# Altium schematic symbol library FPGAENTRY.SchLib: 48 symbols
Pins are listed as number, name and electrical type; pins without a type are passive.

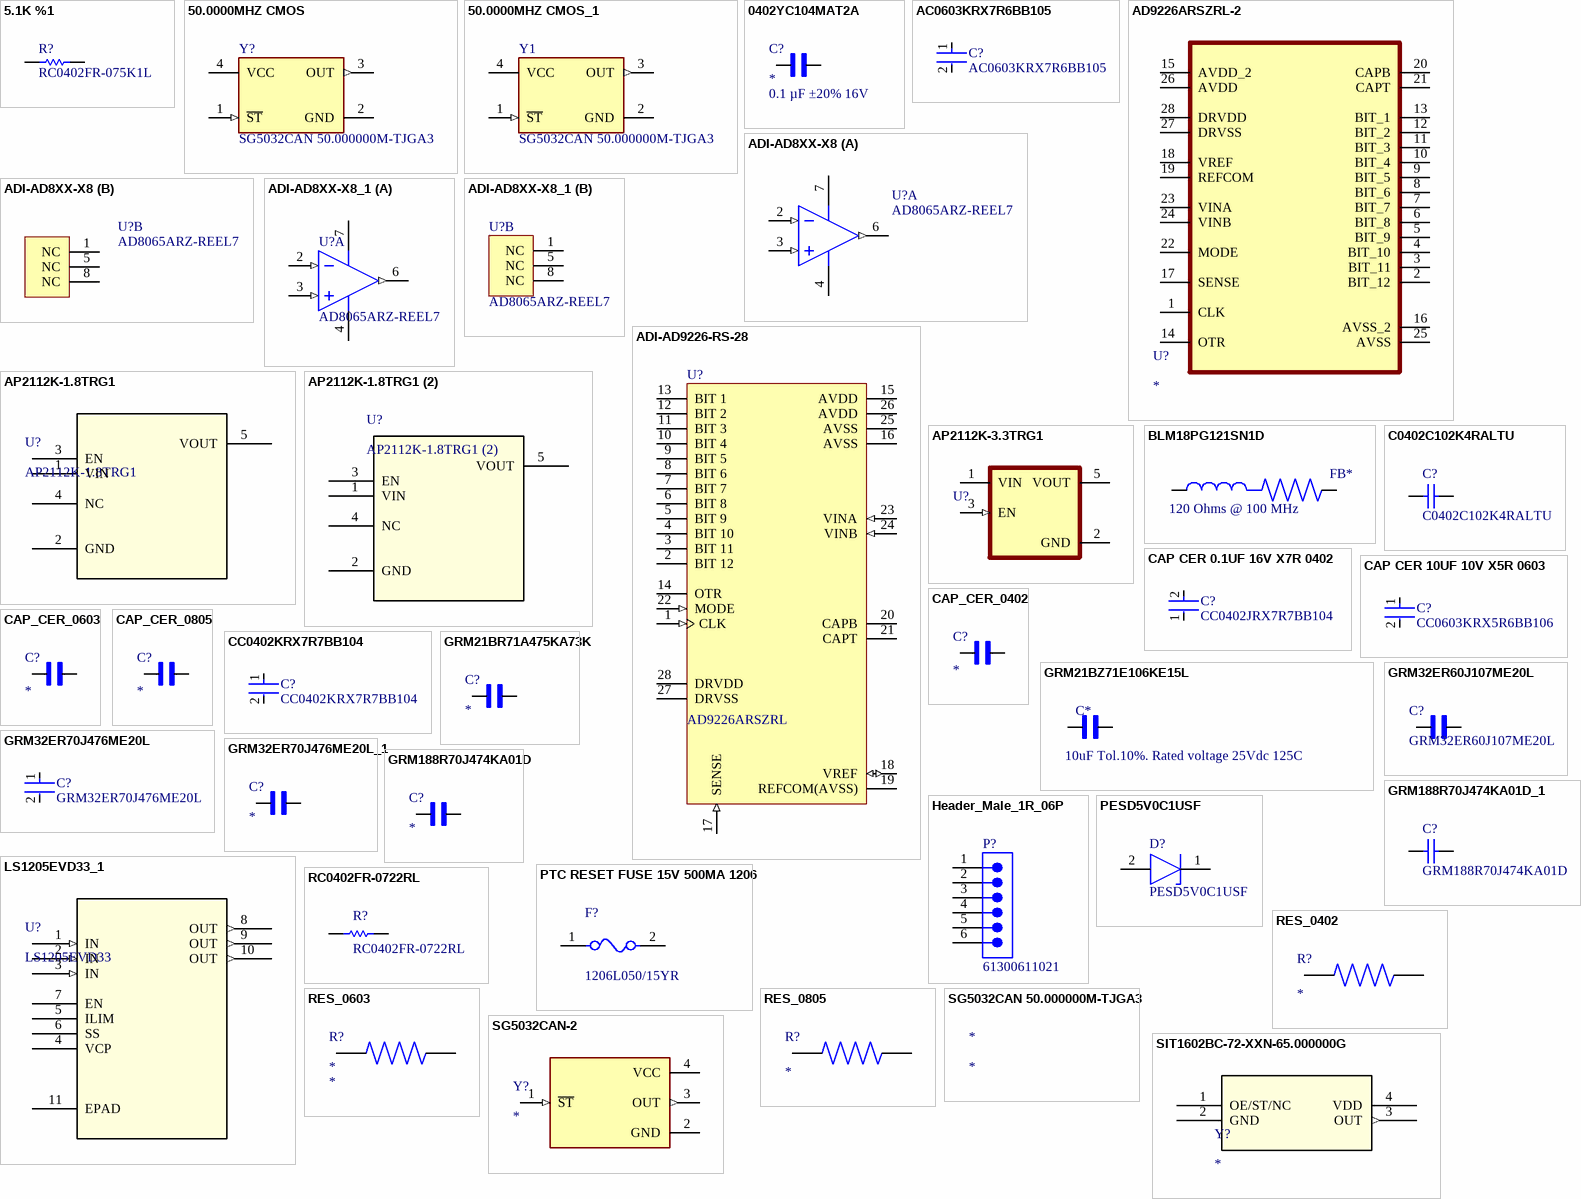
[diagram p0: symbols 5.1K %1 to SIT1602BC-72-XXN-65.000000G]

## 5.1K %1
designator R?, comment RC0402FR-075K1L
Manufacturer: Yageo / Phycomp; Part Number: RC0402FR-075K1L
footprint RESC1005X40X25NL05T10 (Chip Resistor, 2-Leads, Body 1.00x0.50mm, IPC Medium Density)
footprint RESC1005X40X25ML05T10 (Chip Resistor, 2-Leads, Body 1.00x0.50mm, IPC Low Density)
footprint RESC1005X40X25LL05T10 (Chip Resistor, 2-Leads, Body 1.00x0.50mm, IPC High Density)
pins: 1, 2
1 alternate drawing of the same symbol

## 50.0000MHZ CMOS
designator Y?, comment SG5032CAN 50.000000M-TJGA3
XTAL OSC XO 50.0000MHZ CMOS SMD; Manufacturer Part Number: SG5032CAN 40.000000M-TJGA3; Manufacturer: EPSON; Max Supply Current: 2.2mA; Frequency: 50MHz; Min Supply Voltage: 1.6V; Load Capacitance: 15pF; Max Supply Voltage: 3.63V; Fall Time: 4ns; Frequency Stability: 50ppm; Temperature: -40°C to +85°C; Category: Crys; Device Class L3: Oscillators; Package: 0; Automotive: No; Digikey Description: XTAL OSC XO 40.0000MHZ CMOS SMD; ComponentLink2URL: https://support.epson.biz/td/api/doc_check.php?dl=brief_SG7050CAN&lang=en; ComponentLink2Description: Datasheet; Lead Free: Yes; Octopart: https://octopart.com/sg5032can+40.000000m-tjga3-epson-58756424; Series: SG5032CAN; Device Class L1: Passive Components; Height: 1.3mm; RoHS: TRUE; Temperature Range High: +85°C; Device Class L2: Crystals / Oscillators; Temperature Range Low: -40°C; Supplier: Future Electronics; Supplier Part Number: SG5032CAN 50.000000M-TJGA3; Pricing: 250=1,38, 500=1,36 (USD); Case/Package: SMD/SMT; China RoHS: Compliant; Country of Origin: Japan, Mainland China, Malaysia, Thailand; Introduction Date: 2015-02-06; Length: 5.0038mm; Max Operating Temperature: 85°C; Min Operating Temperature: -40°C; Mounting Technology: Surface Mount; Number of Terminals: 4; Output Type: CMOS; REACH SVHC: Yes; Rise Time: 4ns; Schedule B: 8542390000; Width: 3.2004mm; ComponentLink1URL: https://datasheet.octopart.com:443/SG5032CAN50.000000M-TJGA3-Epson-datasheet-180664827.pdf?src-supplier=IHS; ComponentLink1Description: https://datasheet.octopart.com:443/SG5032CAN50.000000M-TJGA3-Epson-datasheet-180664827.pdf?src-supplier=IHS; ComponentLink3URL: https://datasheet.octopart.com:443/SG5032CAN-50.000000M-TJGA3-Epson-datasheet-149135270.pdf?src-supplier=Electro+Sonic; ComponentLink3Description: https://datasheet.octopart.com:443/SG5032CAN-50.000000M-TJGA3-Epson-datasheet-149135270.pdf?src-supplier=Electro+Sonic; ComponentLink4URL: https://datasheet.octopart.com:443/SG5032CAN50.000000M-TJGA3-Epson-datasheet-189100305.pdf?src-supplier=Electro+Sonic; ComponentLink4Description: https://datasheet.octopart.com:443/SG5032CAN50.000000M-TJGA3-Epson-datasheet-189100305.pdf?src-supplier=Electro+Sonic; ComponentLink5URL: https://datasheet.octopart.com:443/SG5032CAN-50.000000M-TJGA3-Epson-datasheet-64290201.pdf?src-supplier=ODG+(Origin+Data+Global); ComponentLink5Description: https://datasheet.octopart.com:443/SG5032CAN-50.000000M-TJGA3-Epson-datasheet-64290201.pdf?src-supplier=ODG+(Origin+Data+Global); ComponentLink6URL: https://datasheet.octopart.com:443/SG5032CAN-50.000000M-TJGA3-Epson-datasheet-164319076.pdf?src-supplier=Arrow.cn; ComponentLink6Description: https://datasheet.octopart.com:443/SG5032CAN-50.000000M-TJGA3-Epson-datasheet-164319076.pdf?src-supplier=Arrow.cn; ComponentLink7URL: https://datasheet.octopart.com:443/SG5032CAN-50.000000M-TJGA3-Epson-datasheet-140567393.pdf?src-supplier=Arrow.cn; ComponentLink7Description: https://datasheet.octopart.com:443/SG5032CAN-50.000000M-TJGA3-Epson-datasheet-140567393.pdf?src-supplier=Arrow.cn; ComponentLink8URL: http://sigma.octopart.com:80/149135295/rohs_statement/Epson-SG5032CAN-50.000000M-TJGA3.pdf?src-supplier=Compliance+Statements; ComponentLink8Description: http://sigma.octopart.com:80/149135295/rohs_statement/Epson-SG5032CAN-50.000000M-TJGA3.pdf?src-supplier=Compliance+Statements; ComponentLink9URL: http://sigma.octopart.com:80/149135294/reach_statement/Epson-SG5032CAN-50.000000M-TJGA3.pdf?src-supplier=Compliance+Statements; ComponentLink9Description: http://sigma.octopart.com:80/149135294/reach_statement/Epson-SG5032CAN-50.000000M-TJGA3.pdf?src-supplier=Compliance+Statements; Lifecycle Status: Production; ComponentLink10URL: https://datasheet.octopart.com:443/SIT1602BC-72-XXN-65.000000G-SiTime-datasheet-168041894.pdf?src-supplier=IHS; ComponentLink10Description: https://datasheet.octopart.com:443/SIT1602BC-72-XXN-65.000000G-SiTime-datasheet-168041894.pdf?src-supplier=IHS; ComponentLink11URL: https://datasheet.octopart.com:443/SIT1602BC-72-XXN-65.000000G-SiTime-datasheet-180805158.pdf?src-supplier=IHS; ComponentLink11Description: https://datasheet.octopart.com:443/SIT1602BC-72-XXN-65.000000G-SiTime-datasheet-180805158.pdf?src-supplier=IHS
footprint FP-SG5032CAN_40_000000M-T-MFG
pins: 1 ~{ST} (in), 2 GND (power), 3 OUT (out), 4 VCC (power)

## 50.0000MHZ CMOS_1
designator Y1, comment SG5032CAN 50.000000M-TJGA3
XTAL OSC XO 50.0000MHZ CMOS SMD; Manufacturer Part Number: SG5032CAN 40.000000M-TJGA3; Manufacturer: EPSON; Max Supply Current: 2.2mA; Frequency: 50MHz; Min Supply Voltage: 1.6V; Load Capacitance: 15pF; Max Supply Voltage: 3.63V; Fall Time: 4ns; Frequency Stability: 50ppm; Temperature: -40°C to +85°C; Category: Crys; Device Class L3: Oscillators; Package: 0; Automotive: No; Digikey Description: XTAL OSC XO 40.0000MHZ CMOS SMD; ComponentLink2URL: https://support.epson.biz/td/api/doc_check.php?dl=brief_SG7050CAN&lang=en; ComponentLink2Description: Datasheet; Lead Free: Yes; Octopart: https://octopart.com/sg5032can+40.000000m-tjga3-epson-58756424; Series: SG5032CAN; Device Class L1: Passive Components; Height: 1.3mm; RoHS: TRUE; Temperature Range High: +85°C; Device Class L2: Crystals / Oscillators; Temperature Range Low: -40°C; Supplier: Future Electronics; Supplier Part Number: SG5032CAN 50.000000M-TJGA3; Pricing: 250=1,38, 500=1,36 (USD); Case/Package: SMD/SMT; China RoHS: Compliant; Country of Origin: Japan, Mainland China, Malaysia, Thailand; Introduction Date: 2015-02-06; Length: 5.0038mm; Max Operating Temperature: 85°C; Min Operating Temperature: -40°C; Mounting Technology: Surface Mount; Number of Terminals: 4; Output Type: CMOS; REACH SVHC: Yes; Rise Time: 4ns; Schedule B: 8542390000; Width: 3.2004mm; ComponentLink1URL: https://datasheet.octopart.com:443/SG5032CAN50.000000M-TJGA3-Epson-datasheet-180664827.pdf?src-supplier=IHS; ComponentLink1Description: https://datasheet.octopart.com:443/SG5032CAN50.000000M-TJGA3-Epson-datasheet-180664827.pdf?src-supplier=IHS; ComponentLink3URL: https://datasheet.octopart.com:443/SG5032CAN-50.000000M-TJGA3-Epson-datasheet-149135270.pdf?src-supplier=Electro+Sonic; ComponentLink3Description: https://datasheet.octopart.com:443/SG5032CAN-50.000000M-TJGA3-Epson-datasheet-149135270.pdf?src-supplier=Electro+Sonic; ComponentLink4URL: https://datasheet.octopart.com:443/SG5032CAN50.000000M-TJGA3-Epson-datasheet-189100305.pdf?src-supplier=Electro+Sonic; ComponentLink4Description: https://datasheet.octopart.com:443/SG5032CAN50.000000M-TJGA3-Epson-datasheet-189100305.pdf?src-supplier=Electro+Sonic; ComponentLink5URL: https://datasheet.octopart.com:443/SG5032CAN-50.000000M-TJGA3-Epson-datasheet-64290201.pdf?src-supplier=ODG+(Origin+Data+Global); ComponentLink5Description: https://datasheet.octopart.com:443/SG5032CAN-50.000000M-TJGA3-Epson-datasheet-64290201.pdf?src-supplier=ODG+(Origin+Data+Global); ComponentLink6URL: https://datasheet.octopart.com:443/SG5032CAN-50.000000M-TJGA3-Epson-datasheet-164319076.pdf?src-supplier=Arrow.cn; ComponentLink6Description: https://datasheet.octopart.com:443/SG5032CAN-50.000000M-TJGA3-Epson-datasheet-164319076.pdf?src-supplier=Arrow.cn; ComponentLink7URL: https://datasheet.octopart.com:443/SG5032CAN-50.000000M-TJGA3-Epson-datasheet-140567393.pdf?src-supplier=Arrow.cn; ComponentLink7Description: https://datasheet.octopart.com:443/SG5032CAN-50.000000M-TJGA3-Epson-datasheet-140567393.pdf?src-supplier=Arrow.cn; ComponentLink8URL: http://sigma.octopart.com:80/149135295/rohs_statement/Epson-SG5032CAN-50.000000M-TJGA3.pdf?src-supplier=Compliance+Statements; ComponentLink8Description: http://sigma.octopart.com:80/149135295/rohs_statement/Epson-SG5032CAN-50.000000M-TJGA3.pdf?src-supplier=Compliance+Statements; ComponentLink9URL: http://sigma.octopart.com:80/149135294/reach_statement/Epson-SG5032CAN-50.000000M-TJGA3.pdf?src-supplier=Compliance+Statements; ComponentLink9Description: http://sigma.octopart.com:80/149135294/reach_statement/Epson-SG5032CAN-50.000000M-TJGA3.pdf?src-supplier=Compliance+Statements
footprint FP-SG5032CAN_40_000000M-T-MFG
pins: 1 ~{ST} (in), 2 GND (power), 3 OUT (out), 4 VCC (power)

## 0402YC104MAT2A
designator C?  Parameter 1: 0.1 µF ±20% 16V
0.1 µF ±20% 16V Ceramic Capacitor X7R 0402 (1005 Metric)
footprint 0402_cap
pins: 1, 2

## AC0603KRX7R6BB105
designator C?
CAP CER 1UF 10V X7R 0603; Manufacturer: Yageo; Material: Ceramic; Temperature Coefficient: 15%; Automotive Grade: Grade 1; Tolerance: 0.1; RoHS: TRUE; Device Class L2: Capacitors; Temperature Characteristic: X7R; Voltage Rating: 10 V; Automotive: Yes; Temperature Range Low: -55°C; Lead Free: Yes; Value: 1 uF; Device Class L1: Passive Components; Package: AC0603; Temperature: -55°C to +125°C; Device Class L3: Ceramic Capacitors; Temperature Range High: +125°C; ComponentLink2URL: http://www.yageo.com/documents/recent/UPY-AC_NP0X7R_16V-to-630V_12.pdf; Octopart: https://octopart.com/ac0603krx7r6bb105-yageo-87214086; Category: Cap; ComponentLink2Description: Datasheet; Height: 0.9mm; Manufacturer Part Number: AC0603KRX7R6BB105; Ipc Land Pattern Name: CAPC16080X80; Capacitance: 1 uF; Digikey Description: CAP CER 1UF 10V X7R 0603; Footprint Url: http://www.yageo.com/exep/pages/download/literatures/UPY-C_GEN_24.pdf; Mouser Description: Cap Ceramic 1uF 10V X7R 10% SMD 0603 125°C Paper T/R
footprint FP-AC0603-MFG
footprint FP-AC0603-IPC_C
footprint FP-AC0603-IPC_B
footprint FP-AC0603-IPC_A
pins: 1, 2

## AD9226ARSZRL-2
designator U?
12-Bit, 65 MSPS Analog-to-Digital Converter
footprint SSOP-28
pins: 1 CLK, 2 BIT_12, 3 BIT_11, 4 BIT_10, 5 BIT_9, 6 BIT_8, 7 BIT_7, 8 BIT_6, 9 BIT_5, 10 BIT_4, 11 BIT_3, 12 BIT_2, 13 BIT_1, 14 OTR, 15 AVDD_2, 16 AVSS_2, 17 SENSE, 18 VREF, 19 REFCOM, 20 CAPB, 21 CAPT, 22 MODE, 23 VINA, 24 VINB, 25 AVSS, 26 AVDD, 27 DRVSS, 28 DRVDD

## ADI-AD8XX-X8
designator U?, comment AD8065ARZ-REEL7
Single Channel Low Power Operational Amplifier, 145 MHz BW, 180 V/us SR, Industrial, 8-pin SOIC (R-8), Reel; Manufacturer: Analog Devices; Generic Part Number: AD8065; V Span Max: 24V; Input Bias Current: 2pA; V Span Min: 5V; Small Signal Bandwidth: 145MHz; Input Offset Voltage: 400uV; Iq/Amp: 7.4mA; Amplifiers Per Package: 1; Automotive Qualified: Yes; PartNumber: AD8065ARZ-REEL7; ComponentLink1URL: http://www.analog.com/en/index.html; PackageVersion: 060506-A; DatasheetVersion: Rev. J; ComponentLink4URL: http://www.analog.com/en/all-operational-amplifiers-op-amps/operational-amplifiers-op-amps/ad8065/products/product.html#product-recommendations; ComponentLink2URL: http://www.analog.com/static/imported-files/data_sheets/AD8065_8066.pdf; PackageDescription: 8-Pin Standard Small Outline Package, Body 3.9 x 4.9 mm, Pitch 1.27 mm; ComponentLink2Description: Datasheet; ComponentLink1Description: Manufacturer URL; Mounting Technology: Surface Mount; PackageReference: R-8; ComponentLink3Description: Package Specification; Slew Rate: 180V/us; RevisionNote: Reference Circuit URL fixed; ComponentLink4Description: Reference Circuit; Code_JEDEC: MS-012-AA; ComponentLink3URL: http://www.analog.com/static/imported-files/packages/PKG_PDF/SOIC_Narrow%20(R)/R_8.pdf
footprint SOIC-8
part A pins: 2 -IN (in), 3 +IN (in), 4 -VS (power), 6 VOUT (out), 7 +VS (power)
part B pins: 1 NC, 5 NC, 8 NC

## ADI-AD8XX-X8_1
designator U?, comment AD8065ARZ-REEL7
Single Channel Low Power Operational Amplifier, 145 MHz BW, 180 V/us SR, Industrial, 8-pin SOIC (R-8), Reel; Manufacturer: Analog Devices; Generic Part Number: AD8065; V Span Max: 24V; Input Bias Current: 2pA; V Span Min: 5V; Small Signal Bandwidth: 145MHz; Input Offset Voltage: 400uV; Iq/Amp: 7.4mA; Amplifiers Per Package: 1; Automotive Qualified: Yes; PartNumber: AD8065ARZ-REEL7; ComponentLink1URL: http://www.analog.com/en/index.html; PackageVersion: 060506-A; DatasheetVersion: Rev. J; ComponentLink4URL: http://www.analog.com/en/all-operational-amplifiers-op-amps/operational-amplifiers-op-amps/ad8065/products/product.html#product-recommendations; ComponentLink2URL: http://www.analog.com/static/imported-files/data_sheets/AD8065_8066.pdf; PackageDescription: 8-Pin Standard Small Outline Package, Body 3.9 x 4.9 mm, Pitch 1.27 mm; ComponentLink2Description: Datasheet; ComponentLink1Description: Manufacturer URL; Mounting Technology: Surface Mount; PackageReference: R-8; ComponentLink3Description: Package Specification; Slew Rate: 180V/us; RevisionNote: Reference Circuit URL fixed; ComponentLink4Description: Reference Circuit; Code_JEDEC: MS-012-AA; ComponentLink3URL: http://www.analog.com/static/imported-files/packages/PKG_PDF/SOIC_Narrow%20(R)/R_8.pdf
footprint ADI-R-8_M (SOIC, 8-Leads, Body 4.9x3.9mm, Pitch 1.27mm, IPC Low Density)
footprint ADI-R-8_L (SOIC, 8-Leads, Body 4.9x3.9mm, Pitch 1.27mm, IPC High Density)
footprint ADI-R-8_N (SOIC, 8-Leads, Body 4.9x3.9mm, Pitch 1.27mm, IPC Medium Density)
part A pins: 2 -IN (in), 3 +IN (in), 4 -VS (power), 6 VOUT (out), 7 +VS (power)
part B pins: 1 NC, 5 NC, 8 NC

## ADI-AD9226-RS-28
designator U?, comment AD9226ARSZRL
Single 12-Bit Analog-to-Digital Converter with Parallel Interface, 65MSPS, -40 to +85 degC, RS-28, Pb-Free, Reel; Generic Part Number: AD9226; Manufacturer: Analog Devices; Resolution (Bits): 12; Channels: 1; Throughput Rate (SPS): 65M; Interface: Par; PackageReference: RS-28; Packing: Reel; ComponentLink4Description: Product URL; DatasheetVersion: Rev.B; PartNumber: AD9226ARSZRL; RoHS: Y; Mounting Technology: Surface Mount; ComponentLink4URL: http://www.analog.com/en/analog-to-digital-converters/ad-converters/ad9226/products/product.html; Code_JEDEC: MO-150-AH; ComponentLink3Description: Package Specification; ComponentLink2URL: http://www.analog.com/static/imported-files/data_sheets/AD9226.pdf; PackageDescription: 28-Lead Shrink Small Outline Package [SSOP]; ComponentLink1Description: Manufacturer URL; ComponentLink3URL: http://www.analog.com/static/imported-files/packages/32122249223724RS_28.pdf; ComponentLink2Description: Datasheet; ComponentLink1URL: http://www.analog.com/en/index.html; PackageVersion: 060106-A; Supplier: Arrow Electronics; Supplier Part Number: W25Q64JVZPIQ
footprint RS-28_N (SOP, 28-Leads, Body 10.2x5.3mm, Pitch 0.65mm, IPC Medium Density)
footprint RS-28_L (SOP, 28-Leads, Body 10.2x5.3mm, Pitch 0.65mm, IPC High Density)
footprint RS-28_M (SOP, 28-Leads, Body 10.2x5.3mm, Pitch 0.65mm, IPC Low Density)
pins: 1 CLK (in) "Clock Input Pin", 2 BIT 12 (hiz) "Least Significant Data Bit (LSB)", 3 BIT 11 (hiz) "Data Output Bit", 4 BIT 10 (hiz) "Data Output Bit", 5 BIT 9 (hiz) "Data Output Bit", 6 BIT 8 (hiz) "Data Output Bit", 7 BIT 7 (hiz) "Data Output Bit", 8 BIT 6 (hiz) "Data Output Bit", 9 BIT 5 (hiz) "Data Output Bit", 10 BIT 4 (hiz) "Data Output Bit", 11 BIT 3 (hiz) "Data Output Bit", 12 BIT 2 (hiz) "Data Output Bit", 13 BIT 1 (hiz) "Most Significant Data Bit (MSB)", 14 OTR (hiz) "Out of Range", 15 AVDD (power) "5 V Analog Supply", 16 AVSS (power) "Analog Ground", 17 SENSE (in) "Reference Select", 18 VREF (io) "Input Span Select (Reference I/O)", 19 REFCOM(AVSS) (power) "Reference Common", 20 CAPB "Noise Reduction Pin", 21 CAPT "Noise Reduction Pin", 22 MODE (in) "Data Format Select /Clock Stabilizer", 23 VINA (in) "Analog Input Pin (+)", 24 VINB (in) "Analog Input Pin (-)", 25 AVSS (power) "Analog Ground", 26 AVDD (power) "5 V Analog Supply", 27 DRVSS (power) "Digital Output Driver Ground", 28 DRVDD (power) "3 V to 5 V Digital Output Driver Supply"

## AP2112K-1.8TRG1
designator U?
Description; Manufacturer_Name: Diodes Inc; Copyright: Copyright (C) 2026 Ultra Librarian. All rights reserved.; Manufacturer_Part_Number: AP2112K-1.8TRG1; RefDes: RefDes; Type: Type
footprint AP2112K-1.8TRG1_DIO
footprint AP2112K-1.8TRG1_DIO
pins: 1 VIN, 2 GND, 3 EN, 4 NC, 5 VOUT

## AP2112K-1.8TRG1 (2)
designator U?
AP2112 Series 1.8 V 600 mA Fixed Output SMT Voltage Regulator - SOT-23-5; Manufacturer: Diodes Inc.; Accuracy: 1.5%; Dropout Voltage: 500mV; Max Supply Voltage: 6V; Max Junction Temperature (Tj): 85°C; Max Output current: 600mA; Min Input Voltage: 2.5V; Number of Channels: 1; Output Voltage: 1.8V; Polarity: Positive; Quiescent Current: 80µA; Supplier: Arrow Electronics; Supplier Part Number: AP2112K-1.8TRG1; Manufacturer Part Number: AP2112K-1.8TRG1; RoHS: Compliant; Category: LDO Voltage Regulators; Stock: 5067; Pricing: 1=0,0897, 10=0,0624, 25=0,0577 (USD); Case/Package: LSSOP; China RoHS: Compliant; Export Control Classification Number (ECCN) Code: EAR99; Height: 1.3mm; Height - Seated (Max): 1.45mm; Harmonized Tariff Schedule (HTS) Code: 8542.39.00.60; Length: 2.92mm; Lifecycle Status: Production; Max Operating Temperature: 85°C; Min Operating Temperature: -40°C; Mounting Technology: Surface Mount; Number of Circuits: 1; Number of Outputs: 1; Pins: 5; Number of Regulators: 1; Number of Terminals: 5; Output Current: 600mA; Output Type: Fixed; Packaging: Tape & Reel (TR); REACH SVHC: Yes; Schedule B: 8542390000, 8542390000|8542390000, 8542390000|8542390000|8542390000, 8542390000|8542390000|8542390000|8542390000; Terminal Pitch: 950µm; Voltage Tolerance: 1.5%; Width: 1.6mm; ComponentLink1URL: https://datasheet.octopart.com:443/AP2112K-1.8TRG1-Diodes-Inc.-datasheet-101745658.pdf?src-supplier=IHS; ComponentLink1Description: https://datasheet.octopart.com:443/AP2112K-1.8TRG1-Diodes-Inc.-datasheet-101745658.pdf?src-supplier=IHS; ComponentLink2URL: https://datasheet.octopart.com:443/AP2112K-1.8TRG1-Diodes-Inc.-datasheet-182385097.pdf?src-supplier=IHS; ComponentLink2Description: https://datasheet.octopart.com:443/AP2112K-1.8TRG1-Diodes-Inc.-datasheet-182385097.pdf?src-supplier=IHS; ComponentLink3URL: https://datasheet.octopart.com:443/AP2112K-1.8TRG1-Diodes-Inc.-datasheet-37177583.pdf?src-supplier=SHENGYU+ELECTRONICS; ComponentLink3Description: https://datasheet.octopart.com:443/AP2112K-1.8TRG1-Diodes-Inc.-datasheet-37177583.pdf?src-supplier=SHENGYU+ELECTRONICS
footprint AP2112K-1.8TRG1_DIO
pins: 1 VIN, 2 GND, 3 EN, 4 NC, 5 VOUT

## AP2112K-3.3TRG1
designator U?  (value not drawn)
Linear Voltage Regulator IC Positive Fixed 1 Output 600mA SOT-25
footprint SOT-25
pins: 1 VIN (power), 2 GND (power), 3 EN (in), 5 VOUT (power)

## BLM18PG121SN1D
designator FB*  Parameter 1: 120 Ohms @ 100 MHz  (hidden comment: *)
120 Ohms @ 100 MHz 1 Power Line Ferrite Bead 0603 (1608 Metric) 2A 50mOhm
footprint 0603_FB
pins: 1, 2

## C0402C102K4RALTU
designator C?
0.001 uF; Manufacturer: Kemet; Part Number: C0402C102K4RALTU
footprint CAPC1005X60X30ML05T10 (Chip Capacitor, 2-Leads, Body 1.00x0.50mm, IPC Low Density)
footprint CAPC1005X60X30LL05T10 (Chip Capacitor, 2-Leads, Body 1.00x0.50mm, IPC High Density)
footprint CAPC1005X60X30NL05T10 (Chip Capacitor, 2-Leads, Body 1.00x0.50mm, IPC Medium Density)
pins: 1, 2
1 alternate drawing of the same symbol

## CAP CER 0.1UF 16V X7R 0402
designator C?, comment CC0402JRX7R7BB104
CAP CER 0.1UF 16V X7R 0402; Tolerance: 5%; Capacitance: 100nF; Lead Free: Lead Free; Halogen Free: Halogen Free; Voltage Rating (DC): 16V; Thickness: 0.022inch; Resistor Type: Ceramic; Min Operating Temperature: -55°C; Width: 0.02inch; Voltage Rating: 16V; Package Quantity: 10000; Case/Package: 0402; Height: 0.5mm; Dielectric: X7R; Length: 1mm; Construction: Flat; Radiation Hardening: No; Case Code (Metric): 1005; Case Code (Imperial): 0402; Series: CC; Depth: 0.5mm; RoHS Compliant: Yes; Packaging: Tape and Reel; Mount: Surface Mount; Max Operating Temperature: 125°C
footprint FP-CC0402-0_05-0_55-L2_0-MFG
footprint FP-CC0402-0_05-0_55-L2_0-IPC_C
footprint FP-CC0402-0_05-0_55-L2_0-IPC_B
footprint FP-CC0402-0_05-0_55-L2_0-IPC_A
pins: 1, 2

## CAP CER 10UF 10V X5R 0603
designator C?, comment CC0603KRX5R6BB106
CAP CER 10UF 10V X5R 0603; Tolerance: 10%; Case/Package: 0603; Length: 0.063inch; Capacitance: 10uF; Dielectric: X5R; Mount: Surface Mount; Case Code (Metric): 1608; Depth: 0.8mm; Voltage Rating (DC): 10V; Voltage Rating: 10V; Lead Free: Lead Free; Resistor Type: Ceramic; Packaging: Tape and Reel; Max Operating Temperature: 85°C; Termination: SMD/SMT; Min Operating Temperature: -55°C; Weight: 7.1E-05oz; Thickness: 0.035inch; Case Code (Imperial): 0603; Package Quantity: 4000; Halogen Free: Halogen Free; RoHS Compliant: Yes; Width: 0.031inch
footprint FP-CC0603-DC-IPC_A
footprint FP-CC0603-DC-IPC_B
footprint FP-CC0603-DC-IPC_C
footprint FP-CC0603-DC-MFG
pins: 1, 2

## CAP_CER_0402
designator C?
Parameter 1: *
footprint 0402
pins: 1, 2

## CAP_CER_0603
designator C?
Parameter 1: *
footprint 0603
pins: 1, 2

## CAP_CER_0805
designator C?
Parameter 1: *
footprint 0805
pins: 1, 2

## CC0402KRX7R7BB104
designator C?
CAP CER 0.1UF 16V X7R 0402; Manufacturer: YAGEO; Material: Ceramic; Automotive Grade: NA; Capacitance: 100 nF; Temperature Coefficient: 30ppm/°C; Tolerance: 0.1; Value: 100 nF; Device Class L1: Passive Components; Temperature Range Low: -55°C; Device Class L3: Ceramic Capacitors; Temperature Characteristic: X7R; Ipc Land Pattern Name: CAPC10050X50; Temperature Range High: +125°C; Voltage Rating: 16 V; Temperature: -55°C to +125°C; RoHS: TRUE; Automotive: No; Height: 0.55mm; Device Class L2: Capacitors; Digikey Description: CAP CER 0.1UF 16V X7R 0402; Package: CC0402; Footprint Url: http://www.yageo.com/exep/pages/download/literatures/UPY-C_GEN_24.pdf; ComponentLink2Description: Datasheet; Category: Cap; Lead Free: Yes; Octopart: https://octopart.com/cc0402krx7r7bb104-yageo-42244624; ComponentLink2URL: http://www.yageo.com/documents/recent/UPY-GP_NP0_16V-to-50V_16.pdf; Manufacturer Part Number: CC0402KRX7R7BB104; Mouser Description: 0402 0.1 uF 16 V ±10 % Tolerance X7R SMT Multilayer Ceramic Capacitor
footprint FP-CC0402-MFG
footprint FP-CC0402-IPC_C
footprint FP-CC0402-IPC_B
footprint FP-CC0402-IPC_A
pins: 1, 2

## GRM21BR71A475KA73K
designator C?
GRM21BR71A475KA73K
footprint GRM21BR71A475KA73K
pins: 1, 2

## GRM21BZ71E106KE15L
designator C*  Parameter 1: 10uF Tol.10%. Rated voltage 25Vdc 125C  (hidden comment: *)
SMD capacitor X7R(MURATA) with capacitance 10uF Tol.10%. Rated voltage 25Vdc 125C
pins: 1, 2

## GRM32ER60J107ME20L
designator C?
footprint GRM32ER60J107ME20L
pins: 1, 2

## GRM32ER70J476ME20L
designator C?
Chip Multilayer Ceramic Capacitors for General Purpose, 1210, 47uF, X7R, 15%, 20%, 6.3V; Capacitance: 47uF; Radiation Hardening: No; Termination: SMD/SMT; Lead Free: Lead Free; Length: 3.2mm; Depth: 2.5mm; Thickness: 0.106inch; Case Code (Metric): 3225; Width: 0.098inch; Dielectric: X7R; Case/Package: 1210; Mount: Surface Mount; Packaging: Tape and Reel; Package Quantity: 1; Height: 2.5mm; Tolerance: 20%; Max Operating Temperature: 125°C; Voltage Rating (DC): 6.3V; Case Code (Imperial): 1210; Min Operating Temperature: -55°C; Voltage Rating: 6.3V
footprint FP-GRM32E-0_3-0_2-IPC_C
footprint FP-GRM32E-0_3-0_2-MFG
footprint FP-GRM32E-0_3-0_2-IPC_A
footprint FP-GRM32E-0_3-0_2-IPC_B
pins: 1, 2

## GRM32ER70J476ME20L_1
designator C?
footprint GRM32ER70J476ME20L
pins: 1, 2

## GRM188R70J474KA01D
designator C?
GRM188R70J474KA01D
footprint GRM188R70J474KA01D
pins: 1, 2

## GRM188R70J474KA01D_1
designator C?, comment GRM188R70J474KA01D
Manufacturer: Murata; Part Number: GRM188R70J474KA01D
footprint CAPC1608X90X35LL10T15 (Chip Capacitor, 2-Leads, Body 1.60x0.80mm, IPC High Density)
footprint CAPC1608X90X35NL10T15 (Chip Capacitor, 2-Leads, Body 1.60x0.80mm, IPC Medium Density)
footprint CAPC1608X90X35ML10T15 (Chip Capacitor, 2-Leads, Body 1.60x0.80mm, IPC Low Density)
pins: 1, 2
1 alternate drawing of the same symbol

## Header_Male_1R_06P
designator P?, comment 61300611021
WR-PHD Right Angle Male, PCB Header, Through Hole, 1 Rows, 6 Contacts, 2.54mm Pitch; Operating Supply Voltage: 250V; Connector Type: Male Pin; Current Rating: 3A; Number of Positions: 6; Contact Resistance: 20mΩ; Contact Material: Copper; Contact Mating Length: 5.9944mm; Number of Rows: 1; Termination: Solder; Number of Pins: 6; RoHS: Compliant; Gender: Male; Lead Pitch: 2.54mm; Mount: Through Hole; Packaging: Bulk; Number of Contacts: 6; Contact Plating: Gold; Pitch: 2.54mm; Color: Black
footprint 61300611021 (WR-PHD Right Angle Male, PCB Header, Through Hole, 1 Rows, 6 Contacts, 2.54mm Pitch)
pins: 1, 2, 3, 4, 5, 6

## LS1205EVD33_1
designator U?, comment LS1205EVD33
Hot Swap Controller 1-CH 18V N-Channel Electronic Fuse 8-Pin DFN EP T/R; Manufacturer_Name: Littelfuse Inc; Copyright: Copyright (C) 2026 Ultra Librarian. All rights reserved.; Manufacturer_Part_Number: LS1205EVD33; RefDes: RefDes; Type: Type
footprint DFN10_3x3_LTF
pins: 1 IN (in), 2 IN (in), 3 IN (in), 4 VCP, 5 ILIM, 6 SS, 7 EN, 8 OUT (out), 9 OUT (out), 10 OUT (out), 11 EPAD (power)

## PESD5V0C1USF
designator D?
TVS DIODE 5V 3V DSN0603-2
footprint FP-SOD962-2-MFG
pins: 1 C, 2 A

## PTC RESET FUSE 15V 500MA 1206
designator F?, comment 1206L050/15YR
PTC RESET FUSE 15V 500MA 1206; Manufacturer: Littelfuse Inc; Trip Time: 0.1s; Trip Current: 1A; Value: 0.15-0.75Ω; Hold Current: 0.5A; Current Rating: 100A; Device Class L2: PTC Resettable Fuses; Height: 0.75mm; Temperature Range High: +85°C; Automotive: No; Package: 1206L; Lead Free: Yes; Mouser Description: Resettable Fuses - PPTC 15V 1206 .500A POLYFUSE; Digikey Description: PTC RESET FUSE 15V 500MA 1206; Manufacturer Part Number: 1206L050/15YR; Voltage Rating: 15V; Temperature Range Low: -40°C; Device Class L3: unset; Device Class L1: Circuit Protection; ComponentLink2URL: https://www.littelfuse.com/~/media/electronics/datasheets/resettable_ptcs/littelfuse_ptc_1206l_datasheet.pdf.pdf; RoHS: TRUE; Ambient Temperature Range High: +85°C; Temperature: -40°C to +85°C; Resistance: 0.15-0.75Ω; Ambient Temperature Range Low: -40°C; Octopart: https://octopart.com/1206l050%2F15yr-littelfuse-673645; ComponentLink2Description: Datasheet; Category: Fuse
footprint FP-1206L-MFG
pins: 1, 2

## RC0402FR-0722RL
designator R?
Tolerance: 1%; Power Rating: 63mW; Voltage Rating: 50V; Temperature Coefficient: 100ppm/°C; Resistance: 22Ω; Termination: SMD/SMT; Depth: 500µm; Packaging: Tape & Reel; Height: 400µm; Width: 500µm; Case Code (Imperial): 0402; Length: 1mm; Schedule B: 8533210045, 8533210045; Case/Package: 0402; Max Operating Temperature: 155°C; Min Operating Temperature: -55°C; REACH SVHC: Unknown; RoHS: Compliant; Military Standard: Not; Voltage Rating (DC): 50V; Lead Free: Lead Free; Voltage Rating (AC): 50V; Number of Pins: 2; Composition: Thick Film
footprint FP-RC0402-0_4-MFG
footprint FP-RC0402-0_4-IPC_A
footprint FP-RC0402-0_4-IPC_B
footprint FP-RC0402-0_4-IPC_C
pins: 1, 2

## RES_0402
designator R?
Parameter 1: *
footprint 0402
pins: 1, 2

## RES_0603
designator R?
Parameter 1: *
footprint 0603
pins: 1, 2

## RES_0805
designator R?
Parameter 1: *
footprint 0805
pins: 1, 2

## SG5032CAN 50.000000M-TJGA3
designator *
Oscillator XO ±50ppm 15pF CMOS 55% 1.8V/2.5V/3.3V 4-Pin SMD T/R; Manufacturer: Epson; Manufacturer Part Number: SG5032CAN 50.000000M-TJGA3; Fall Time: 4ns; Frequency: 50MHz; Max Supply Current: 3mA; Max Supply Voltage: 3.6V; Min Supply Voltage: 1.6V; Supplier: Future Electronics; Supplier Part Number: SG5032CAN 50.000000M-TJGA3; RoHS: Compliant; Category: Crystals; Pricing: 250=1,38, 500=1,36 (USD); Case/Package: SMD/SMT; China RoHS: Compliant; Country of Origin: Japan, Mainland China, Malaysia, Thailand; Frequency Stability: 50ppm; Height: 1.2954mm; Introduction Date: 2015-02-06; Length: 5.0038mm; Load Capacitance: 15pF; Max Operating Temperature: 85°C; Min Operating Temperature: -40°C; Mounting Technology: Surface Mount; Number of Terminals: 4; Output Type: CMOS; REACH SVHC: Yes; Rise Time: 4ns; Schedule B: 8542390000; Width: 3.2004mm; ComponentLink1URL: https://datasheet.octopart.com:443/SG5032CAN50.000000M-TJGA3-Epson-datasheet-180664827.pdf?src-supplier=IHS; ComponentLink1Description: https://datasheet.octopart.com:443/SG5032CAN50.000000M-TJGA3-Epson-datasheet-180664827.pdf?src-supplier=IHS; ComponentLink2URL: https://datasheet.octopart.com:443/SG5032CAN-50.000000M-TJGA3-Epson-datasheet-149135270.pdf?src-supplier=Electro+Sonic; ComponentLink2Description: https://datasheet.octopart.com:443/SG5032CAN-50.000000M-TJGA3-Epson-datasheet-149135270.pdf?src-supplier=Electro+Sonic; ComponentLink3URL: https://datasheet.octopart.com:443/SG5032CAN50.000000M-TJGA3-Epson-datasheet-189100305.pdf?src-supplier=Electro+Sonic; ComponentLink3Description: https://datasheet.octopart.com:443/SG5032CAN50.000000M-TJGA3-Epson-datasheet-189100305.pdf?src-supplier=Electro+Sonic; ComponentLink4URL: https://datasheet.octopart.com:443/SG5032CAN-50.000000M-TJGA3-Epson-datasheet-64290201.pdf?src-supplier=ODG+(Origin+Data+Global); ComponentLink4Description: https://datasheet.octopart.com:443/SG5032CAN-50.000000M-TJGA3-Epson-datasheet-64290201.pdf?src-supplier=ODG+(Origin+Data+Global); ComponentLink5URL: https://datasheet.octopart.com:443/SG5032CAN-50.000000M-TJGA3-Epson-datasheet-164319076.pdf?src-supplier=Arrow.cn; ComponentLink5Description: https://datasheet.octopart.com:443/SG5032CAN-50.000000M-TJGA3-Epson-datasheet-164319076.pdf?src-supplier=Arrow.cn; ComponentLink6URL: https://datasheet.octopart.com:443/SG5032CAN-50.000000M-TJGA3-Epson-datasheet-140567393.pdf?src-supplier=Arrow.cn; ComponentLink6Description: https://datasheet.octopart.com:443/SG5032CAN-50.000000M-TJGA3-Epson-datasheet-140567393.pdf?src-supplier=Arrow.cn; ComponentLink7URL: http://sigma.octopart.com:80/149135295/rohs_statement/Epson-SG5032CAN-50.000000M-TJGA3.pdf?src-supplier=Compliance+Statements; ComponentLink7Description: http://sigma.octopart.com:80/149135295/rohs_statement/Epson-SG5032CAN-50.000000M-TJGA3.pdf?src-supplier=Compliance+Statements; ComponentLink8URL: http://sigma.octopart.com:80/149135294/reach_statement/Epson-SG5032CAN-50.000000M-TJGA3.pdf?src-supplier=Compliance+Statements; ComponentLink8Description: http://sigma.octopart.com:80/149135294/reach_statement/Epson-SG5032CAN-50.000000M-TJGA3.pdf?src-supplier=Compliance+Statements
footprint SG5032CAN

## SG5032CAN-2
designator Y?
SG5032CAN
footprint SG5032CAN
pins: 1 ~{ST} (in), 2 GND (power), 3 OUT (out), 4 VCC (power)

## SIT1602BC-72-XXN-65.000000G
designator Y?
Oscillator MEMS 65MHz ±25ppm (Stability) 15pF HCMOS/LVCMOS 55% 2.5V/3.3V 4-Pin QFN SMD T/R; Manufacturer: SiTime; Manufacturer Part Number: SIT1602BC-72-XXN-65.000000G; Fall Time: 2ns; Max Supply Voltage: 3.63V; Min Supply Voltage: 2.25V; Output Type: LVCMOS; Supplier: Avnet; Supplier Part Number: SIT1602BC-72-XXN-65.000000G; RoHS: Compliant; Category: Crystals; Pricing: 250=0,94997, 500=0,93011, 1000=0,91025, 2000=0,89039, 4000=0,87053 (USD); Country of Origin: Malaysia, Taiwan, Thailand; Frequency: 65MHz; Frequency Stability: 25ppm; Introduction Date: 2017-05-31; Lifecycle Status: Production; Load Capacitance: 15pF; Max Operating Temperature: 70°C; Min Operating Temperature: -20°C; Mounting Technology: Surface Mount; Number of Terminals: 4; REACH SVHC: Yes; Rise Time: 2ns; ComponentLink1URL: https://datasheet.octopart.com:443/SIT1602BC-72-XXN-65.000000G-SiTime-datasheet-168041894.pdf?src-supplier=IHS; ComponentLink1Description: https://datasheet.octopart.com:443/SIT1602BC-72-XXN-65.000000G-SiTime-datasheet-168041894.pdf?src-supplier=IHS; ComponentLink2URL: https://datasheet.octopart.com:443/SIT1602BC-72-XXN-65.000000G-SiTime-datasheet-180805158.pdf?src-supplier=IHS; ComponentLink2Description: https://datasheet.octopart.com:443/SIT1602BC-72-XXN-65.000000G-SiTime-datasheet-180805158.pdf?src-supplier=IHS
footprint SON4_SIT1602-7_SIT
pins: 1 OE/ST/NC, 2 GND (power), 3 OUT (out), 4 VDD (power)

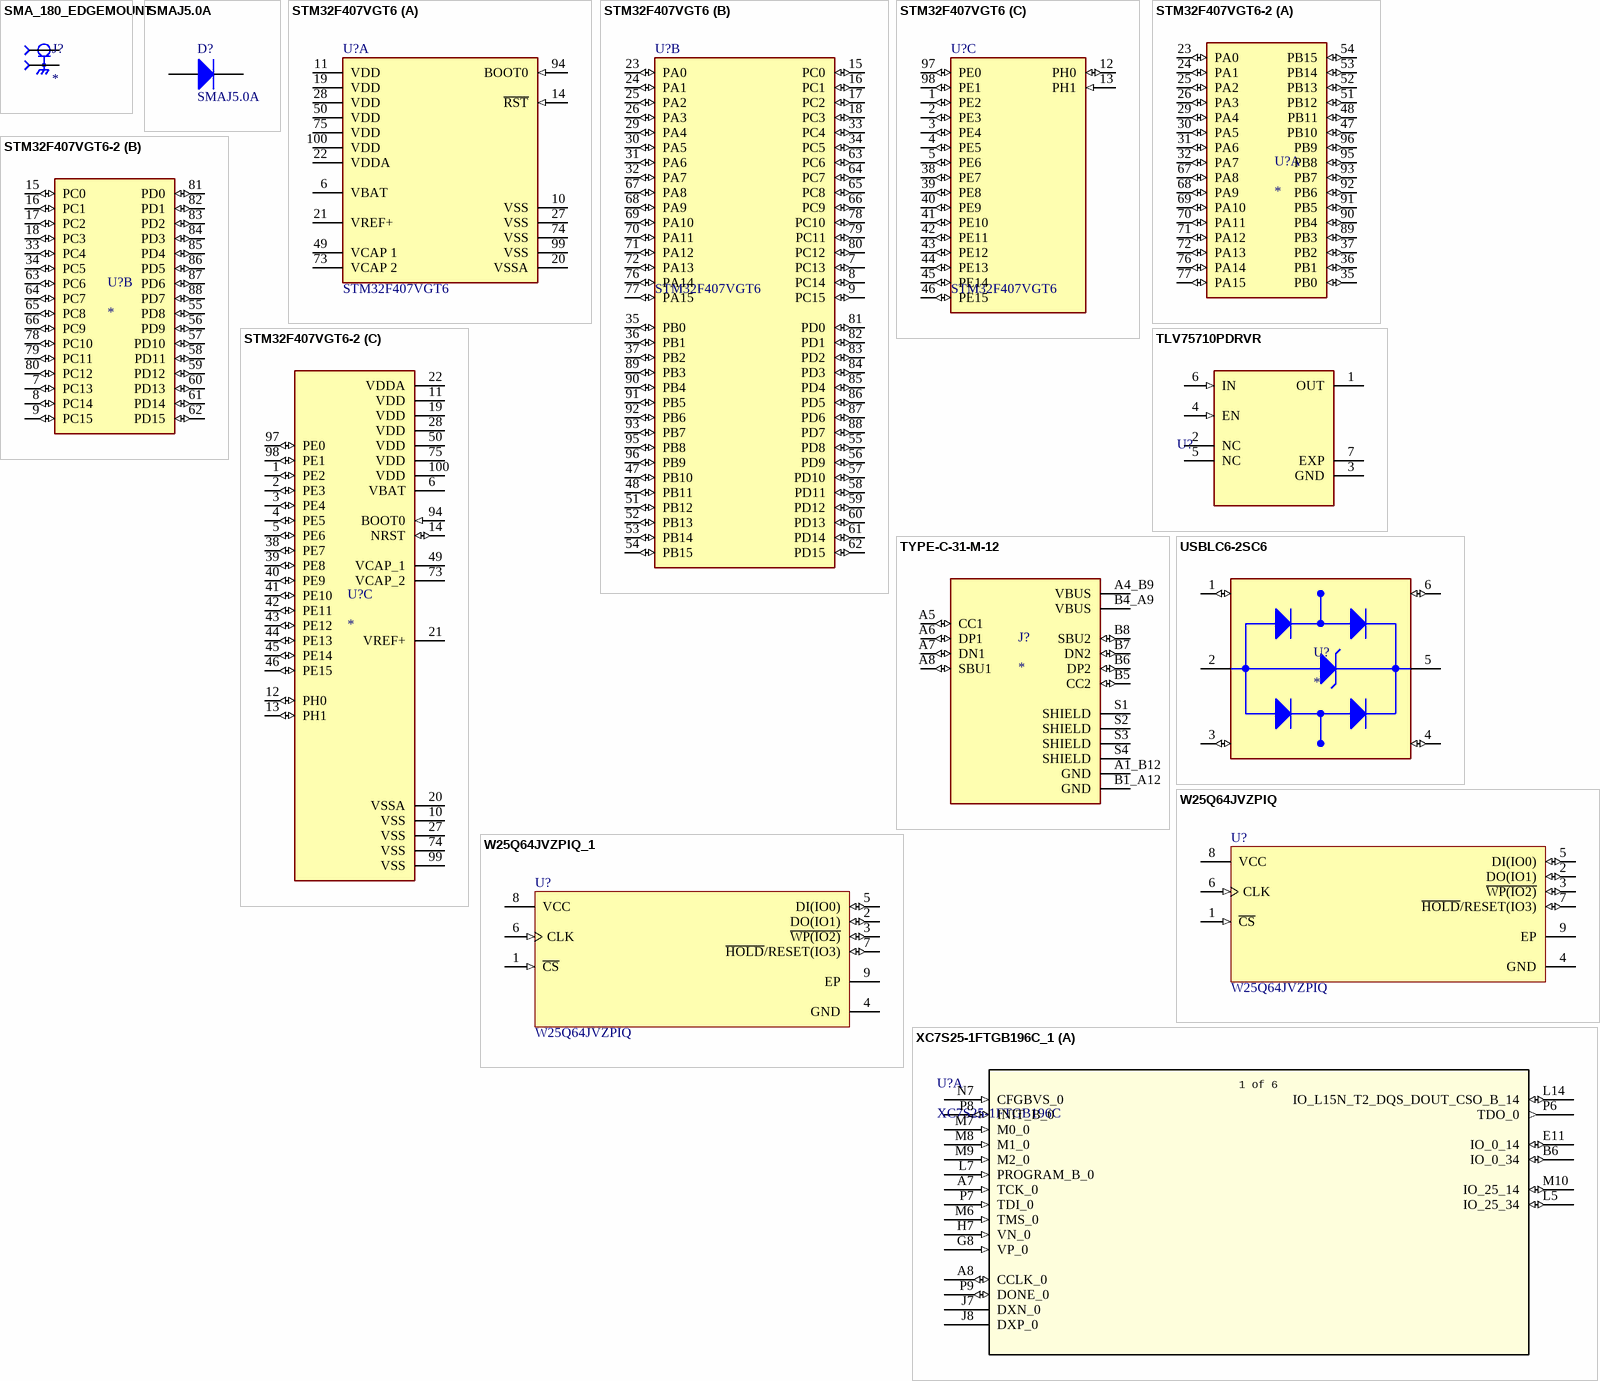
[diagram p1: symbols SMA_180_EDGEMOUNT to XC7S25-1FTGB196C_1]

## SMA_180_EDGEMOUNT
designator J?
footprint SMA
pins: 1, G1 2, G2 2, G3 2, G4 2

## SMAJ5.0A
designator D?
SMAJ Transient Voltage Suppressor Diode Series, 3.5 V, -55 to 150 degC, 2-Pin SMA, RoHS, Tape and Reel; Manufacturer: Bourns; EDA / CAD Models: DownloadfromAcceleratedDesigns; Unidirectional Channels: 1; Voltage - Breakdown (Min): 6.4V; Voltage - Reverse Standoff (Typ): 5V; Voltage - Clamping (Max) @ Ipp: 9.2V; Other Names: SMAJ5.0ABDKR; Type: Zener; Catalog Drawings: SMAJSeriesFootprintSMAJ,SMBJSeries; Featured Product: SMAJ/SMBJ/SMCJ/SMLJDiscreteTVSDiodes; Power - Peak Pulse: 400W; Current - Peak Pulse (10/1000µs): 43.5A; Power Line Protection: No; Online Catalog: SMAJSeries; Supplier Device Package: SMA(DO-214AC); Operating Temperature: -55°C~150°C(TJ); Package Description: 2-Pin Surface Mount Device, Body 4.315 x 2.605 mm; Datasheet URL: https://datasheet.ciiva.com/25624/0900766b8112213b-25624680.pdf; Manufacturer URL: http://www.bourns.com/; Datasheet Version: 08/2012; Series: SMAJ; Family: TVS-Diodes; Bidirectional Channels: -; Applications: GeneralPurpose; Package Reference: SMA-2; Standard Package: 1; Package / Case: DO-214AC,SMA; Category: CircuitProtection; RoHS Information: SMAJSeriesMaterialDeclaration; Mounting Technology: SurfaceMount; Capacitance @ Frequency: -; Packaging: Digi-Reel®; Mounting Type: SurfaceMount
footprint BOUR-SMA-2_V (SMA, 2-Leads, Body 4.57x2.92mm)
pins: 1 A, 2 K

## STM32F407VGT6
designator U?
NexarPartId: 20570110; Manufacturer Package Identifier: 1L_ME_V5; Peripherals: Brown-out Detect/Reset, DMA, I2C, LCD, POR, PWM, WDT; Number of Programmable I/O: 82; Oscillator Type: Internal; Nominal Supply Current: 1.7µA; Number of Timers/Counters: 14; RAM Size: 192kB; Number of D/A Converters: 2; Number of Ethernet Channels: 1; Max Frequency: 168MHz; Number of SPI Channels: 3; Data Bus Width: 32b; Number of ADC Channels: 16; Max Supply Voltage: 3.6V; Number of USART Channels: 4; Interface: CAN, Ethernet, I2C, I2S, IrDA, LIN, SPI, UART, USART, USB; Max Junction Temperature (Tj): 125°C; Core Architecture: ARM Cortex-M4; Watchdog Timer: Yes; Memory Size: 1MB; Memory Type: FLASH; Min Supply Voltage: 1.8V; Number of I/Os: 82; Lead Free: Lead Free; Lifecycle Status: Production; Radiation Hardening: No; Frequency: 168MHz; Max Operating Temperature: 85°C; Height: 1.45mm; Number of Pins: 100; Number of I2C Channels: 3; Number of USB Channels: 1; REACH SVHC: No SVHC; Length: 14.2mm; Ambient Temperature Range High: 85°C; Schedule B: 8542310000, 8542310000; Number of Channels: 16; Number of A/D Converters: 3; Width: 14.2mm; Case/Package: LQFP; Flash Memory Size: 1MB; Min Operating Temperature: -40°C; Address Bus Width: 32b; Number of UART Channels: 2; RoHS: Compliant; Number of PWM Channels: 2
footprint FP-LQFP100-1L-MFG (MCU 32-bit STM32F ARM Cortex M4F RISC 1024KB Flash 2.5V/3.3V 100-Pin LQFP Tray)
footprint FP-LQFP100-1L-IPC_A (MCU 32-bit STM32F ARM Cortex M4F RISC 1024KB Flash 2.5V/3.3V 100-Pin LQFP Tray)
footprint FP-LQFP100-1L-IPC_B (MCU 32-bit STM32F ARM Cortex M4F RISC 1024KB Flash 2.5V/3.3V 100-Pin LQFP Tray)
footprint FP-LQFP100-1L-IPC_C (MCU 32-bit STM32F ARM Cortex M4F RISC 1024KB Flash 2.5V/3.3V 100-Pin LQFP Tray)
part A pins: 6 VBAT (power), 10 VSS (power), 11 VDD (power), 14 ~{RST} (in), 19 VDD (power), 20 VSSA (power), 21 VREF+ (power), 22 VDDA (power), 27 VSS (power), 28 VDD (power), 49 VCAP 1 (power), 50 VDD (power), 73 VCAP 2 (power), 74 VSS (power), 75 VDD (power), 94 BOOT0 (in), 99 VSS (power), 100 VDD (power)
part B pins: 7 PC13 (io), 8 PC14 (io), 9 PC15 (io), 15 PC0 (io), 16 PC1 (io), 17 PC2 (io), 18 PC3 (io), 23 PA0 (io), 24 PA1 (io), 25 PA2 (io), 26 PA3 (io), 29 PA4 (io), 30 PA5 (io), 31 PA6 (io), 32 PA7 (io), 33 PC4 (io), 34 PC5 (io), 35 PB0 (io), 36 PB1 (io), 37 PB2 (io), 47 PB10 (io), 48 PB11 (io), 51 PB12 (io), 52 PB13 (io), 53 PB14 (io), 54 PB15 (io), 55 PD8 (io), 56 PD9 (io), 57 PD10 (io), 58 PD11 (io), 59 PD12 (io), 60 PD13 (io), 61 PD14 (io), 62 PD15 (io), 63 PC6 (io), 64 PC7 (io), 65 PC8 (io), 66 PC9 (io), 67 PA8 (io), 68 PA9 (io), 69 PA10 (io), 70 PA11 (io), 71 PA12 (io), 72 PA13 (io), 76 PA14 (io), 77 PA15 (io), 78 PC10 (io), 79 PC11 (io), 80 PC12 (io), 81 PD0 (io), 82 PD1 (io), 83 PD2 (io), 84 PD3 (io), 85 PD4 (io), 86 PD5 (io), 87 PD6 (io), 88 PD7 (io), 89 PB3 (io), 90 PB4 (io), 91 PB5 (io), 92 PB6 (io), 93 PB7 (io), 95 PB8 (io), 96 PB9 (io)
part C pins: 1 PE2 (io), 2 PE3 (io), 3 PE4 (io), 4 PE5 (io), 5 PE6 (io), 12 PH0 (io), 13 PH1 (in), 38 PE7 (io), 39 PE8 (io), 40 PE9 (io), 41 PE10 (io), 42 PE11 (io), 43 PE12 (io), 44 PE13 (io), 45 PE14 (io), 46 PE15 (io), 97 PE0 (io), 98 PE1 (io)

## STM32F407VGT6-2
designator U?
footprint LQFP100
part A pins: 23 PA0 (io), 24 PA1 (io), 25 PA2 (io), 26 PA3 (io), 29 PA4 (io), 30 PA5 (io), 31 PA6 (io), 32 PA7 (io), 35 PB0 (io), 36 PB1 (io), 37 PB2 (io), 47 PB10 (io), 48 PB11 (io), 51 PB12 (io), 52 PB13 (io), 53 PB14 (io), 54 PB15 (io), 67 PA8 (io), 68 PA9 (io), 69 PA10 (io), 70 PA11 (io), 71 PA12 (io), 72 PA13 (io), 76 PA14 (io), 77 PA15 (io), 89 PB3 (io), 90 PB4 (io), 91 PB5 (io), 92 PB6 (io), 93 PB7 (io), 95 PB8 (io), 96 PB9 (io)
part B pins: 7 PC13 (io), 8 PC14 (io), 9 PC15 (io), 15 PC0 (io), 16 PC1 (io), 17 PC2 (io), 18 PC3 (io), 33 PC4 (io), 34 PC5 (io), 55 PD8 (io), 56 PD9 (io), 57 PD10 (io), 58 PD11 (io), 59 PD12 (io), 60 PD13 (io), 61 PD14 (io), 62 PD15 (io), 63 PC6 (io), 64 PC7 (io), 65 PC8 (io), 66 PC9 (io), 78 PC10 (io), 79 PC11 (io), 80 PC12 (io), 81 PD0 (io), 82 PD1 (io), 83 PD2 (io), 84 PD3 (io), 85 PD4 (io), 86 PD5 (io), 87 PD6 (io), 88 PD7 (io)
part C pins: 1 PE2 (io), 2 PE3 (io), 3 PE4 (io), 4 PE5 (io), 5 PE6 (io), 6 VBAT (power), 10 VSS (power), 11 VDD (power), 12 PH0 (io), 13 PH1 (io), 14 NRST (io), 19 VDD (power), 20 VSSA (power), 21 VREF+ (power), 22 VDDA (power), 27 VSS (power), 28 VDD (power), 38 PE7 (io), 39 PE8 (io), 40 PE9 (io), 41 PE10 (io), 42 PE11 (io), 43 PE12 (io), 44 PE13 (io), 45 PE14 (io), 46 PE15 (io), 49 VCAP_1, 50 VDD (power), 73 VCAP_2, 74 VSS (power), 75 VDD (power), 94 BOOT0 (in), 97 PE0 (io), 98 PE1 (io), 99 VSS (power), 100 VDD (power)

## TLV75710PDRVR
designator U?  (value not drawn)
1-A, low-IQ high-accuracy low-dropout (LDO) voltage regulator with enable
footprint WSON-6
pins: 1 OUT (power), 2 NC, 3 GND (power), 4 EN (in), 5 NC, 6 IN (in), 7 EXP (power)

## TYPE-C-31-M-12
designator J?
USB Connectors 24 Receptacle 1 8.94*7.3mm RoHS; MF: HRO Electronics Co., Ltd.; MP: TYPE-C-31-M-12; SnapEDA_Link: https://www.snapeda.com/parts/TYPE-C-31-M-12/HRO+Electronics+Co.%252C+Ltd./view-part/?ref=snap; Package: Package; Value: *; Check_prices: https://www.snapeda.com/parts/TYPE-C-31-M-12/HRO+Electronics+Co.%252C+Ltd./view-part/?ref=eda
footprint HRO_TYPE-C-31-M-12
pins: A1_B12 GND (power), A4_B9 VBUS (power), A5 CC1 (io), A6 DP1 (io), A7 DN1 (io), A8 SBU1 (io), B1_A12 GND (power), B4_A9 VBUS (power), B5 CC2 (io), B6 DP2 (io), B7 DN2 (io), B8 SBU2 (io), S1 SHIELD, S2 SHIELD, S3 SHIELD, S4 SHIELD

## USBLC6-2SC6
designator U?
17V Clamp 5A (8/20Âµs) Ipp Tvs Diode Surface Mount SOT-23-6; MF: STMicroelectronics; MP: USBLC6-2SC6; Value: *; SnapEDA_Link: https://www.snapeda.com/parts/USBLC6-2SC6/STMicroelectronics/view-part/?ref=snap; Check_prices: https://www.snapeda.com/parts/USBLC6-2SC6/STMicroelectronics/view-part/?ref=eda; Purchase-URL: https://pricing.snapeda.com/search/part/USBLC6-2SC6/?ref=eda; Price: None; Availability: In Stock; Package: SOT-23-6 STMicroelectronics
footprint SOT95P280X145-6N
pins: 1 I/O1_IN (io), 2 GND (power), 3 I/O2_IN (io), 4 I/O2_OUT (io), 5 VBUS (power), 6 I/O1_OUT (io)

## W25Q64JVZPIQ
designator U?
W25Q64JVZPIQ NOR Flash Serial (SPI, Dual SPI, Quad SPI) 3V/3.3V 64M-bit 8M x 8 6ns 8-Pin WSON EP T/R/Tray/Tube; NexarPartId: 80966617; Memory Size: 8MB; Max Supply Voltage: 3.6V; Min Supply Voltage: 2.7V; Frequency: 133MHz; Memory Type: FLASH; Height: 800µm; Max Operating Temperature: 85°C; Interface: SPI; Ambient Temperature Range High: 85°C; Min Operating Temperature: -40°C; Schedule B: 8542320070, 8542320070; RoHS: Non-Compliant; Access Time: 6ns; Supplier: Future Electronics; Supplier Part Number: SG5032CAN 25.000000M-TJGA3
footprint FP-ZP-MFG
footprint FP-ZP-IPC_A
footprint FP-ZP-IPC_B
footprint FP-ZP-IPC_C
pins: 1 ~{CS} (in), 2 DO(IO1) (io), 3 ~{WP(IO2)} (io), 4 GND (power), 5 DI(IO0) (io), 6 CLK (in), 7 ~{HOLD}/RESET(IO3) (io), 8 VCC (power), 9 EP (power)

## W25Q64JVZPIQ_1
designator U?, comment W25Q64JVZPIQ
W25Q64JVZPIQ NOR Flash Serial (SPI, Dual SPI, Quad SPI) 3V/3.3V 64M-bit 8M x 8 6ns 8-Pin WSON EP T/R/Tray/Tube; NexarPartId: 80966617; Memory Size: 8MB; Max Supply Voltage: 3.6V; Min Supply Voltage: 2.7V; Frequency: 133MHz; Memory Type: FLASH; Height: 800µm; Max Operating Temperature: 85°C; Interface: SPI; Ambient Temperature Range High: 85°C; Min Operating Temperature: -40°C; Schedule B: 8542320070, 8542320070; RoHS: Non-Compliant; Access Time: 6ns
footprint FP-ZP-MFG
footprint FP-ZP-IPC_A
footprint FP-ZP-IPC_B
footprint FP-ZP-IPC_C
pins: 1 ~{CS} (in), 2 DO(IO1) (io), 3 ~{WP(IO2)} (io), 4 GND (power), 5 DI(IO0) (io), 6 CLK (in), 7 ~{HOLD}/RESET(IO3) (io), 8 VCC (power), 9 EP (power)

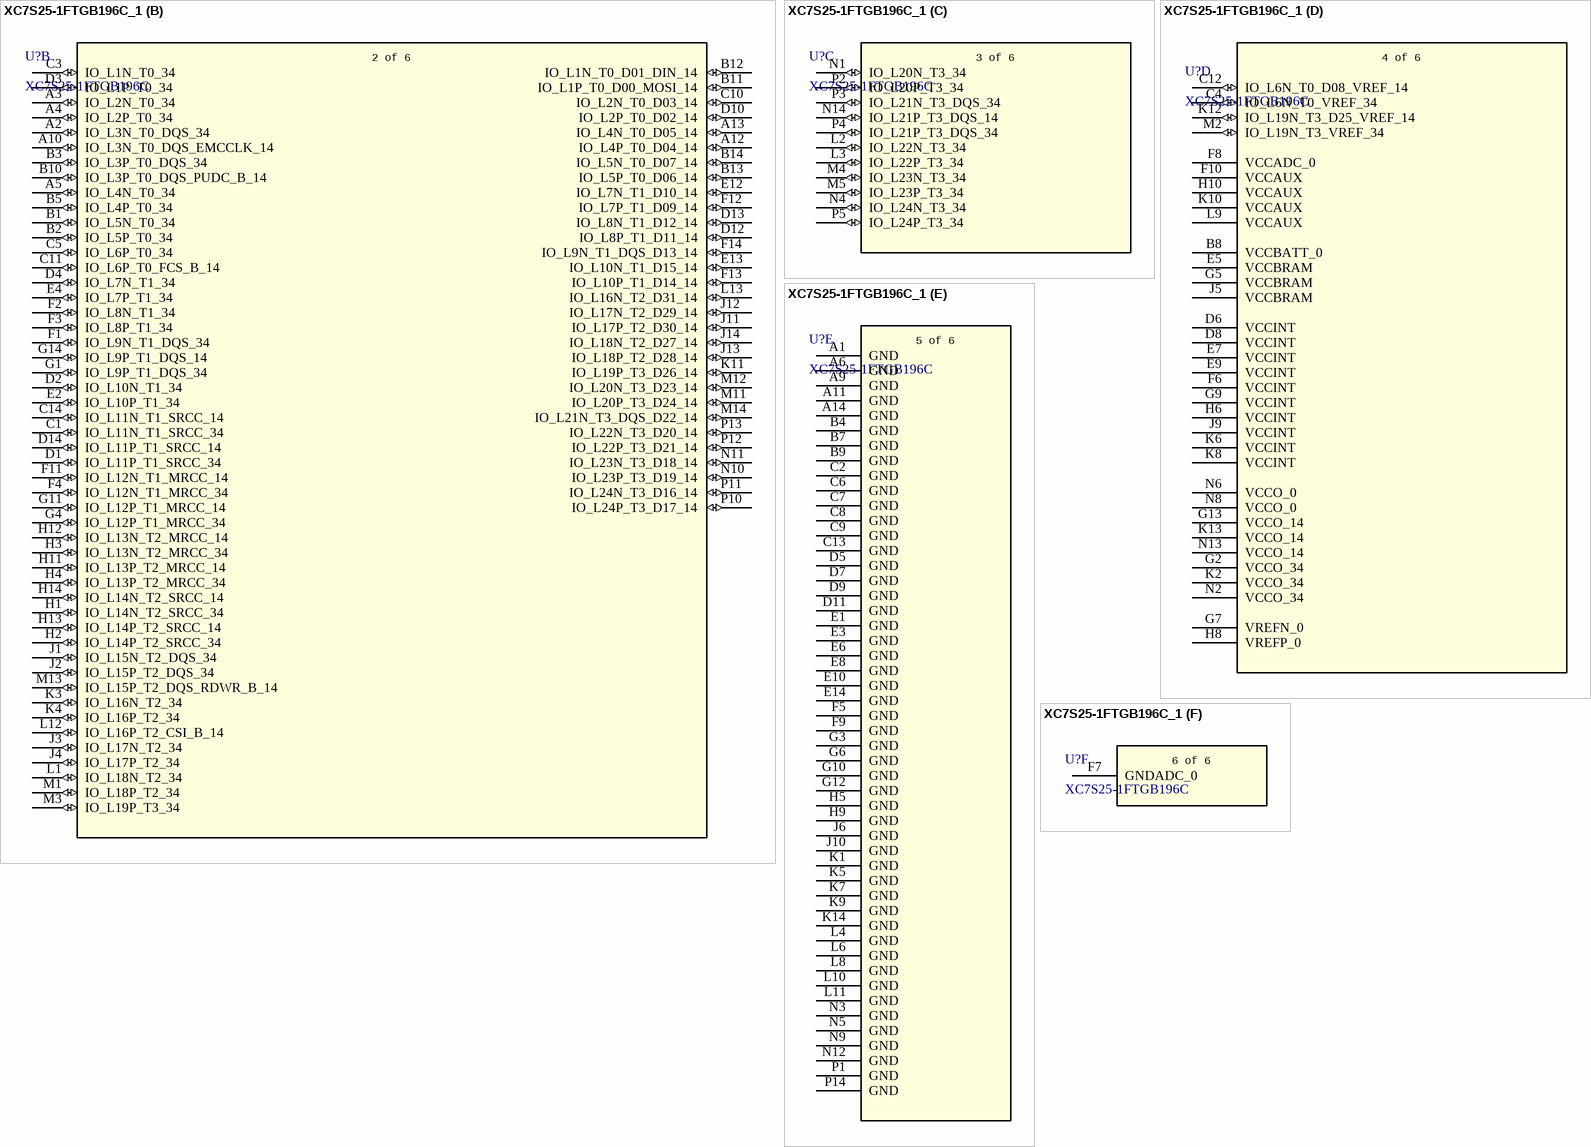
[diagram p2: symbol XC7S25-1FTGB196C_1]

## XC7S25-1FTGB196C_1
designator U?, comment XC7S25-1FTGB196C
Description; Manufacturer_Name: AMD; Type: Embedded; Copyright: Copyright (C) 2025 Ultra Librarian. All rights reserved.; Manufacturer_Part_Number: XC7S25-1FTGB196C; RefDes: RefDes; Supplier: Arrow Electronics; Supplier Part Number: AD9226ARSZ
footprint FTGB196SPARTAN-7_AMD
part A pins: A7 TCK_0 (in), A8 CCLK_0 (io), B6 IO_0_34 (io), E11 IO_0_14 (io), G8 VP_0 (in), H7 VN_0 (in), J7 DXN_0, J8 DXP_0, L5 IO_25_34 (io), L7 PROGRAM_B_0 (in), L14 IO_L15N_T2_DQS_DOUT_CSO_B_14 (io), M6 TMS_0 (in), M7 M0_0 (in), M8 M1_0 (in), M9 M2_0 (in), M10 IO_25_14 (io), N7 CFGBVS_0 (in), P6 TDO_0 (out), P7 TDI_0 (in), P8 INIT_B_0 (io), P9 DONE_0 (io)
part B pins: A2 IO_L3N_T0_DQS_34 (io), A3 IO_L2N_T0_34 (io), A4 IO_L2P_T0_34 (io), A5 IO_L4N_T0_34 (io), A10 IO_L3N_T0_DQS_EMCCLK_14 (io), A12 IO_L4P_T0_D04_14 (io), A13 IO_L4N_T0_D05_14 (io), B1 IO_L5N_T0_34 (io), B2 IO_L5P_T0_34 (io), B3 IO_L3P_T0_DQS_34 (io), B5 IO_L4P_T0_34 (io), B10 IO_L3P_T0_DQS_PUDC_B_14 (io), B11 IO_L1P_T0_D00_MOSI_14 (io), B12 IO_L1N_T0_D01_DIN_14 (io), B13 IO_L5P_T0_D06_14 (io), B14 IO_L5N_T0_D07_14 (io), C1 IO_L11N_T1_SRCC_34 (io), C3 IO_L1N_T0_34 (io), C5 IO_L6P_T0_34 (io), C10 IO_L2N_T0_D03_14 (io), C11 IO_L6P_T0_FCS_B_14 (io), C14 IO_L11N_T1_SRCC_14 (io), D1 IO_L11P_T1_SRCC_34 (io), D2 IO_L10N_T1_34 (io), D3 IO_L1P_T0_34 (io), D4 IO_L7N_T1_34 (io), D10 IO_L2P_T0_D02_14 (io), D12 IO_L8P_T1_D11_14 (io), D13 IO_L8N_T1_D12_14 (io), D14 IO_L11P_T1_SRCC_14 (io), E2 IO_L10P_T1_34 (io), E4 IO_L7P_T1_34 (io), E12 IO_L7N_T1_D10_14 (io), E13 IO_L10N_T1_D15_14 (io), F1 IO_L9N_T1_DQS_34 (io), F2 IO_L8N_T1_34 (io), F3 IO_L8P_T1_34 (io), F4 IO_L12N_T1_MRCC_34 (io), F11 IO_L12N_T1_MRCC_14 (io), F12 IO_L7P_T1_D09_14 (io), F13 IO_L10P_T1_D14_14 (io), F14 IO_L9N_T1_DQS_D13_14 (io), G1 IO_L9P_T1_DQS_34 (io), G4 IO_L12P_T1_MRCC_34 (io), G11 IO_L12P_T1_MRCC_14 (io), G14 IO_L9P_T1_DQS_14 (io), H1 IO_L14N_T2_SRCC_34 (io), H2 IO_L14P_T2_SRCC_34 (io), H3 IO_L13N_T2_MRCC_34 (io), H4 IO_L13P_T2_MRCC_34 (io), H11 IO_L13P_T2_MRCC_14 (io), H12 IO_L13N_T2_MRCC_14 (io), H13 IO_L14P_T2_SRCC_14 (io), H14 IO_L14N_T2_SRCC_14 (io), J1 IO_L15N_T2_DQS_34 (io), J2 IO_L15P_T2_DQS_34 (io), J3 IO_L17N_T2_34 (io), J4 IO_L17P_T2_34 (io), J11 IO_L17P_T2_D30_14 (io), J12 IO_L17N_T2_D29_14 (io), J13 IO_L18P_T2_D28_14 (io), J14 IO_L18N_T2_D27_14 (io), K3 IO_L16N_T2_34 (io), K4 IO_L16P_T2_34 (io), K11 IO_L19P_T3_D26_14 (io), L1 IO_L18N_T2_34 (io), L12 IO_L16P_T2_CSI_B_14 (io), L13 IO_L16N_T2_D31_14 (io), M1 IO_L18P_T2_34 (io), M3 IO_L19P_T3_34 (io), M11 IO_L20P_T3_D24_14 (io), M12 IO_L20N_T3_D23_14 (io), M13 IO_L15P_T2_DQS_RDWR_B_14 (io), M14 IO_L21N_T3_DQS_D22_14 (io), N10 IO_L23P_T3_D19_14 (io), N11 IO_L23N_T3_D18_14 (io), P10 IO_L24P_T3_D17_14 (io), P11 IO_L24N_T3_D16_14 (io), P12 IO_L22P_T3_D21_14 (io), P13 IO_L22N_T3_D20_14 (io)
part C pins: L2 IO_L22N_T3_34 (io), L3 IO_L22P_T3_34 (io), M4 IO_L23N_T3_34 (io), M5 IO_L23P_T3_34 (io), N1 IO_L20N_T3_34 (io), N4 IO_L24N_T3_34 (io), N14 IO_L21P_T3_DQS_14 (io), P2 IO_L20P_T3_34 (io), P3 IO_L21N_T3_DQS_34 (io), P4 IO_L21P_T3_DQS_34 (io), P5 IO_L24P_T3_34 (io)
part D pins: B8 VCCBATT_0 (power), C4 IO_L6N_T0_VREF_34 (io), C12 IO_L6N_T0_D08_VREF_14 (io), D6 VCCINT (power), D8 VCCINT (power), E5 VCCBRAM (power), E7 VCCINT (power), E9 VCCINT (power), F6 VCCINT (power), F8 VCCADC_0 (power), F10 VCCAUX (power), G2 VCCO_34 (power), G5 VCCBRAM (power), G7 VREFN_0 (power), G9 VCCINT (power), G13 VCCO_14 (power), H6 VCCINT (power), H8 VREFP_0 (power), H10 VCCAUX (power), J5 VCCBRAM (power), J9 VCCINT (power), K2 VCCO_34 (power), K6 VCCINT (power), K8 VCCINT (power), K10 VCCAUX (power), K12 IO_L19N_T3_D25_VREF_14 (io), K13 VCCO_14 (power), L9 VCCAUX (power), M2 IO_L19N_T3_VREF_34 (io), N2 VCCO_34 (power), N6 VCCO_0 (power), N8 VCCO_0 (power), N13 VCCO_14 (power)
part E pins: A1 GND (power), A6 GND (power), A9 GND (power), A11 GND (power), A14 GND (power), B4 GND (power), B7 GND (power), B9 GND (power), C2 GND (power), C6 GND (power), C7 GND (power), C8 GND (power), C9 GND (power), C13 GND (power), D5 GND (power), D7 GND (power), D9 GND (power), D11 GND (power), E1 GND (power), E3 GND (power), E6 GND (power), E8 GND (power), E10 GND (power), E14 GND (power), F5 GND (power), F9 GND (power), G3 GND (power), G6 GND (power), G10 GND (power), G12 GND (power), H5 GND (power), H9 GND (power), J6 GND (power), J10 GND (power), K1 GND (power), K5 GND (power), K7 GND (power), K9 GND (power), K14 GND (power), L4 GND (power), L6 GND (power), L8 GND (power), L10 GND (power), L11 GND (power), N3 GND (power), N5 GND (power), N9 GND (power), N12 GND (power), P1 GND (power), P14 GND (power)
part F pins: F7 GNDADC_0 (power)
part A text: 1 of 6
part B text: 2 of 6
part C text: 3 of 6
part D text: 4 of 6
part E text: 5 of 6
part F text: 6 of 6